# Altium footprint library ESP32_S3_Pico.PcbLib: 1 footprints
Each footprint in its own frame and in the unit in brackets; x right, y up, seen from the top. Pads: shape width x height; smd on the part's side, far side on the other; paste and mask are expansions set on the pad; w line width, h text height; cw(c..) or ccw(c..) is an arc to the next point about the centre after c.
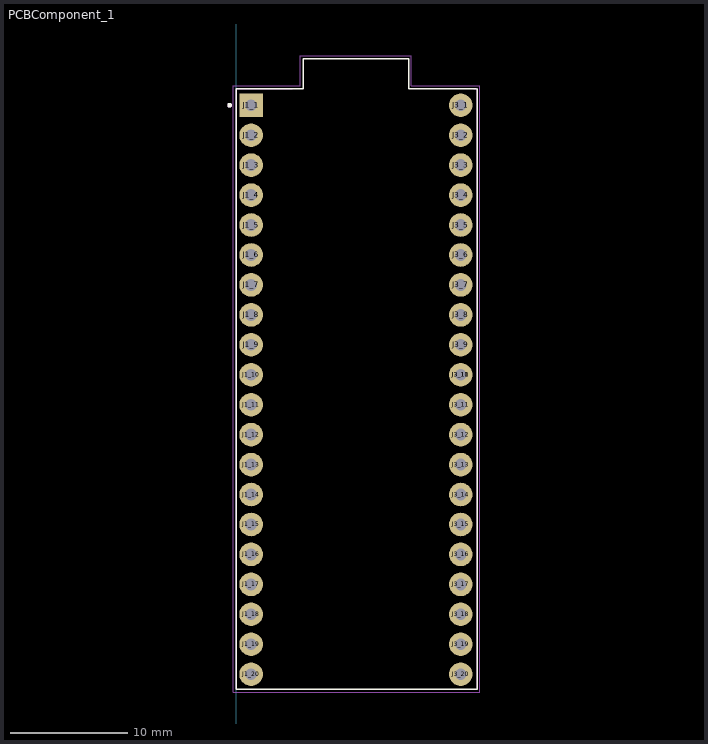
[diagram p0: the footprint, top view; thin cyan lines are the x and y axes]

## PCBComponent_1 [mm]
pads (41):
  rect 2x2 hole 1: J1_1(1.27,61.341)
  round 2 hole 1: J1_2(1.27,58.801) J1_3(1.27,56.261) J1_4(1.27,53.721) J1_5(1.27,51.181) J1_6(1.27,48.641) J1_7(1.27,46.101) J1_8(1.27,43.561) J1_9(1.27,41.021) J1_10(1.27,38.481) J1_11(1.27,35.941) J1_12(1.27,33.401) J1_13(1.27,30.861) J1_14(1.27,28.321) J1_15(1.27,25.781) J1_16(1.27,23.241) J1_17(1.27,20.701) J1_18(1.27,18.161) J1_19(1.27,15.621) J1_20(1.27,13.081) J3_1(19.05,61.341) J3_2(19.05,58.801) J3_3(19.05,56.261) J3_4(19.05,53.721) J3_5(19.05,51.181) J3_6(19.05,48.641) J3_7(19.05,46.101) J3_8(19.05,43.561) J3_9(19.05,41.021) J3_10(19.05,38.481) J3_11(19.05,35.941) J3_11(19.05,38.481) J3_12(19.05,33.401) J3_13(19.05,30.861) J3_14(19.05,28.321) J3_15(19.05,25.781) J3_16(19.05,23.241) J3_17(19.05,20.701) J3_18(19.05,18.161) J3_19(19.05,15.621) J3_20(19.05,13.081)
Top Overlay:
  circle w0.2: c-0.55,61.341 r0.1
  lines w0.127: 5,62.741 0,62.741 ; 20.379,62.738 14.663,62.738 14.663,65.268 6.35,65.268 5.715,65.268 5.715,62.738 0.384,62.738 0.381,62.741 0,62.741 ; 20.447,62.741 20.447,11.811 0,11.811 0,62.741
Mechanical 13:
  circle w0.2: c-0.55,61.341 r0.1
  lines w0.127: 0,11.811 0,62.741 4.746,62.741 ; 20.146,62.741 20.447,62.741 20.447,11.811
Mechanical 15:
  lines w0.05: 20.447,11.557 20.65,11.557 ; 20.65,11.608 20.65,11.557 ; 20.65,11.557 20.65,62.991 20.65,62.992 14.859,62.992 14.859,65.532 5.461,65.532 5.461,62.991 4.75,62.991 -0.25,62.991 -0.25,11.557 20.65,11.557